# Altium footprint library SYNCBOX_V3I1.PcbLib: 251 footprints (part 1 of 16)
Each footprint in its own frame and in the unit in brackets; x right, y up, seen from the top. Pads: shape width x height; smd on the part's side, far side on the other; paste and mask are expansions set on the pad; w line width, h text height; cw(c..) or ccw(c..) is an arc to the next point about the centre after c.
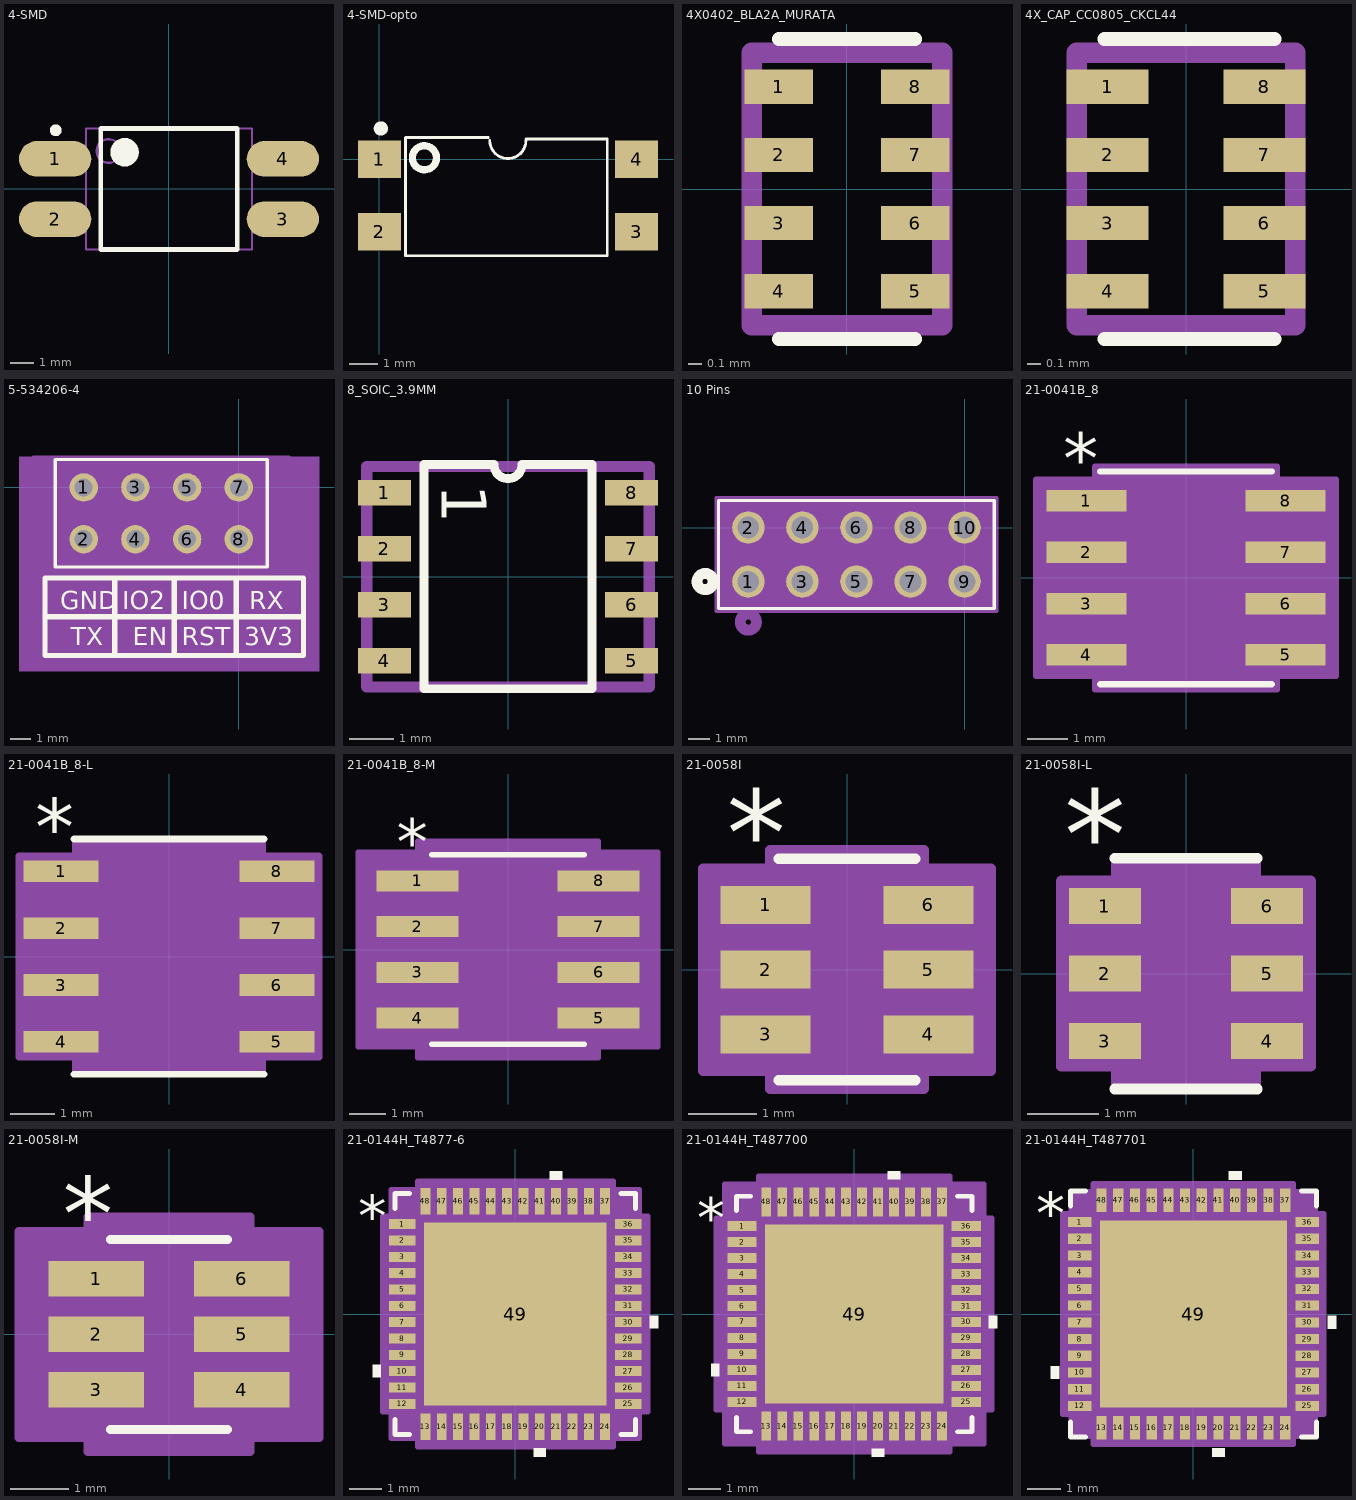
[diagram p0: the footprints below, top view; thin cyan lines are the x and y axes]

## 4-SMD [mm]
height 4.6
pads (4):
  oval 3.05x1.5 smd: 1(-4.8,1.27) 2(-4.8,-1.27) 3(4.8,-1.27) 4(4.8,1.27)
Top Overlay:
  circle w0.6: c-1.875,1.55 r0.3
  lines w0.2: -2.875,-2.55 -2.875,2.55 2.875,2.55 2.875,-2.55 -2.875,-2.55
  lines w0.25: -4.651,2.487 ccw(c-4.775,2.475) -4.65,2.475
Mechanical 13:
  circle w0.1: c-2.55,1.6 r0.5
  lines w0.1: -3.5,-2.55 -3.5,2.55 3.5,2.55 3.5,-2.55 -3.5,-2.55
3D body "LSOP-4.STEP": height 2.07, standoff -0.07, extent -4.947,-1.898 5.253,2.202

## 4-SMD-opto [mm]
pads (4):
  rect 1.5x1.3 smd: 1(0,0) 2(0,-2.54) 3(9,-2.54) 4(9,0)
Top Overlay:
  circle w0.254: c1.575,0.051 r0.423
  lines w0.1: 3.81,0.762 0.914,0.762 0.914,-3.378 7.976,-3.378 7.976,0.711 5.135,0.711 ; 3.861,0.66 ccw(c4.496,0.66) 5.131,0.66
  lines w0.25: 0.175,1.09 ccw(c0.051,1.078) 0.176,1.078
3D body "LSOP-4.STEP": height 2.09, standoff -0.05, extent -0.629,-3.345 9.571,0.755

## 4X0402_BLA2A_MURATA [mm]
pads (8):
  rect 0.5x0.25 smd mask+0.025: 1(-0.5,0.75) 2(-0.5,0.25) 3(-0.5,-0.25) 4(-0.5,-0.75) 5(0.5,-0.75) 6(0.5,-0.25) 7(0.5,0.25) 8(0.5,0.75)
Top Overlay:
  lines w0.1: -0.5,-1.1 0.5,-1.1 ; -0.5,1.1 0.5,1.1
Mechanical 16:
  lines w0.15: -0.7,-1 -0.7,1 0.7,1 0.7,-1 -0.7,-1
Mechanical 29:
  text ".Designator" at 0.2,-0.7 h0.4
3D body: height 0.5, standoff 0, extent -0.5,-1 0.5,1

## 4X_CAP_CC0805_CKCL44 [mm]
pads (8):
  rect 0.6x0.25 smd mask+0.025: 1(-0.575,0.75) 2(-0.575,0.25) 3(-0.575,-0.25) 4(-0.575,-0.75) 5(0.575,-0.75) 6(0.575,-0.25) 7(0.575,0.25) 8(0.575,0.75)
Top Overlay:
  lines w0.1: -0.6,-1.1 0.65,-1.1 ; -0.6,1.1 0.65,1.1
Mechanical 16:
  lines w0.15: -0.8,-1 -0.8,1 0.8,1 0.8,-1 -0.8,-1
Mechanical 29:
  text ".Designator" at -0.2,0.7 h0.4
3D body: height 1, standoff 0, extent -0.7,-1 0.7,1

## 5-534206-4 [mil]
pads (8):
  round 55 / inner round 60 / far side round 55 hole 35 paste+0 mask+0: 1(-300,0) 2(-300,-100) 3(-200,0) 4(-200,-100) 5(-100,0) 6(-100,-100) 7(0,0) 8(0,-100)
Top Overlay:
  lines w6: -355,-154 55,-154 55,54 -355,54 -355,-154
  lines w10: -375,-250 125,-250 ; -240,-325 -240,-175 ; -125,-325 -125,-175 ; -10,-175 -5,-175 -5,-325 ; -375,-325 -375,-175 125,-175 125,-325 -375,-325
  text "GND" at -345,-235 h35
  text "IO2" at -225,-235 h35
  text "IO0" at -110,-235 h35
  text "RX" at 20,-235 h35
  text "TX" at -325,-305 h35
  text "EN" at -205,-305 h35
  text "RST" at -110,-305 h35
  text "3V3" at 10,-305 h35
Mechanical 13:
  lines w1: -350,-149 50,-149 50,49 -350,49 -350,-149
Mechanical 15:
  region: 155,59 -425,59 -425,-355 155,-355
  region: 50,49 -350,49 -350,-149 50,-149
  lines w6: -398,-159 -398,59 98,59 98,-159 -398,-159
3D body: height 10, standoff 0, extent 0,0 10,10
3D body "5-534206-4.stp": height 340, standoff -170, extent -350,-150 50,50

## 8_SOIC_3.9MM [mm]
pads (8):
  rect 1.2x0.58 smd: 1(-2.8,1.905) 2(-2.8,0.635) 3(-2.8,-0.635) 4(-2.8,-1.905) 5(2.8,-1.905) 6(2.8,-0.635) 7(2.8,0.635) 8(2.8,1.905)
Top Overlay:
  lines w0.2: -1.905,-2.54 1.905,-2.54 1.905,2.54 0.318,2.54 cw(c0,2.54) -0.318,2.54 -1.905,2.54 -1.905,-2.54
  text "1" at -1.5,2.1 h1.02
Mechanical 16:
  circle w0.254: c-2.7,1.9 r0.1
  lines w0.254: -3.2,-2.5 -3.2,2.5 3.2,2.5 3.2,-2.5 -3.2,-2.5
Mechanical 29:
  text ".Designator" at 1.1,0.6 h1.52
3D body "SOIC-8-1.step": height 1.75, standoff 0, extent -3,-2.45 3,2.45

## 10 Pins [mil]
pads (10):
  round 60 hole 40 paste+0 mask+0: 1(-400,-100) 2(-400,0) 3(-300,-100) 4(-300,0) 5(-200,-100) 6(-200,0) 7(-100,-100) 8(-100,0) 9(0,-100) 10(0,0)
Top Overlay:
  circle w20: c-480,-100 r15
  lines w6: -455,-150 -455,50 55,50 55,-150 -455,-150
Bottom Overlay:
  circle w20: c-480,-100 r15
Mechanical 13:
  circle w20: c-400,-175 r15
  lines w1: -450,-145 -450,45 50,45 50,-145 -450,-145
Mechanical 15:
  region: 50,45 -450,45 -450,-145 50,-145
  region: 60,55 -460,55 -460,-155 60,-155
  lines w6: -460,-155 60,-155 60,55 -460,55 -460,-155
3D body: height 10, standoff 0, extent 0,0 10,10
3D body "PR20205VBDN.STEP": height 329.79, standoff -100.11, extent -450,-150 50,50

## 21-0041B_8 [mil]
pads (8):
  rect 78x21 smd paste+0 mask+0: 1(-97,75) 2(-97,25) 3(-97,-25) 4(-97,-75) 5(97,-75) 6(97,-25) 7(97,25) 8(97,75)
Top Overlay:
  lines w6: -83.5,-103.5 83.5,-103.5 ; -83.5,103.5 83.5,103.5
  text "*" at -119.5,91 h50
Mechanical 13:
  lines w0: -12,98.5 ccw(c0,98.5) 12,98.5
  lines w1: -122,-84.5 -122,-65.5 -78.5,-65.5 -78.5,-84.5 -122,-84.5 ; -122,-34.5 -122,-15.5 -78.5,-15.5 -78.5,-34.5 -122,-34.5 ; -122,15.5 -122,34.5 -78.5,34.5 -78.5,15.5 -122,15.5 ; -122,65.5 -122,84.5 -78.5,84.5 -78.5,65.5 -122,65.5 ; -78.5,-98.5 78.5,-98.5 78.5,98.5 -78.5,98.5 -78.5,-98.5 ; 78.5,-84.5 78.5,-65.5 122,-65.5 122,-84.5 78.5,-84.5 ; 78.5,-34.5 78.5,-15.5 122,-15.5 122,-34.5 78.5,-34.5 ; 78.5,15.5 78.5,34.5 122,34.5 122,15.5 78.5,15.5 ; 78.5,65.5 78.5,84.5 122,84.5 122,65.5 78.5,65.5
  text "*" at -76,45.5 h50
Mechanical 15:
  region: -88.5,-95.5 -146,-95.5 -146,95.5 -88.5,95.5 -88.5,108.5 88.5,108.5 88.5,95.5 146,95.5 146,-95.5 88.5,-95.5 88.5,-108.5 -88.5,-108.5
  lines w6: -146,-95.5 -146,95.5 -88.5,95.5 -88.5,108.5 88.5,108.5 88.5,95.5 146,95.5 146,-95.5 88.5,-95.5 88.5,-108.5 -88.5,-108.5 -88.5,-95.5 -146,-95.5
3D body "21-0041B_8.stp": height 69.09, standoff 0, extent -122.01,-98.5 122.01,98.5
3D body: height 10, standoff 0, extent 0,0 10,10

## 21-0041B_8-L [mil]
pads (8):
  rect 66x19 smd paste+0 mask+0: 1(-95,75) 2(-95,25) 3(-95,-25) 4(-95,-75) 5(95,-75) 6(95,-25) 7(95,25) 8(95,75)
Top Overlay:
  lines w6: -83.5,-103.5 83.5,-103.5 ; -83.5,103.5 83.5,103.5
  text "*" at -117.5,89 h50
Mechanical 13:
  lines w0: -12,98.5 ccw(c0,98.5) 12,98.5
  lines w1: -122,-84.5 -78.5,-84.5 -78.5,-65.5 -122,-65.5 -122,-84.5 ; -122,-34.5 -78.5,-34.5 -78.5,-15.5 -122,-15.5 -122,-34.5 ; -122,15.5 -78.5,15.5 -78.5,34.5 -122,34.5 -122,15.5 ; -122,65.5 -78.5,65.5 -78.5,84.5 -122,84.5 -122,65.5 ; -78.5,-98.5 -78.5,98.5 78.5,98.5 78.5,-98.5 -78.5,-98.5 ; 78.5,-84.5 122,-84.5 122,-65.5 78.5,-65.5 78.5,-84.5 ; 78.5,-34.5 122,-34.5 122,-15.5 78.5,-15.5 78.5,-34.5 ; 78.5,15.5 122,15.5 122,34.5 78.5,34.5 78.5,15.5 ; 78.5,65.5 122,65.5 122,84.5 78.5,84.5 78.5,65.5
  text "*" at -76,45.5 h50
Mechanical 15:
  region: -82.5,-88.5 -132,-88.5 -132,88.5 -82.5,88.5 -82.5,102.5 82.5,102.5 82.5,88.5 132,88.5 132,-88.5 82.5,-88.5 82.5,-102.5 -82.5,-102.5
  lines w6: -132,-88.5 -82.5,-88.5 -82.5,-102.5 82.5,-102.5 82.5,-88.5 132,-88.5 132,88.5 82.5,88.5 82.5,102.5 -82.5,102.5 -82.5,88.5 -132,88.5 -132,-88.5
3D body "21-0041B_8-L.stp": height 69.09, standoff 0, extent -122,-98.5 122.01,98.51
3D body: height 10, standoff 0, extent 0,0 10,10

## 21-0041B_8-M [mil]
pads (8):
  rect 90x23 smd paste+0 mask+0: 1(-99,75) 2(-99,25) 3(-99,-25) 4(-99,-75) 5(99,-75) 6(99,-25) 7(99,25) 8(99,75)
Top Overlay:
  lines w6: -83.5,-103.5 83.5,-103.5 ; -83.5,103.5 83.5,103.5
  text "*" at -121.5,93 h50
Mechanical 13:
  lines w0: -12,98.5 ccw(c0,98.5) 12,98.5
  lines w1: -122,-84.5 -122,-65.5 -78.5,-65.5 -78.5,-84.5 -122,-84.5 ; -122,-34.5 -122,-15.5 -78.5,-15.5 -78.5,-34.5 -122,-34.5 ; -122,15.5 -122,34.5 -78.5,34.5 -78.5,15.5 -122,15.5 ; -122,65.5 -122,84.5 -78.5,84.5 -78.5,65.5 -122,65.5 ; -78.5,-98.5 78.5,-98.5 78.5,98.5 -78.5,98.5 -78.5,-98.5 ; 78.5,-84.5 78.5,-65.5 122,-65.5 122,-84.5 78.5,-84.5 ; 78.5,-34.5 78.5,-15.5 122,-15.5 122,-34.5 78.5,-34.5 ; 78.5,15.5 78.5,34.5 122,34.5 122,15.5 78.5,15.5 ; 78.5,65.5 78.5,84.5 122,84.5 122,65.5 78.5,65.5
  text "*" at -76,45.5 h50
Mechanical 15:
  region: -98.5,-106.5 -164,-106.5 -164,106.5 -98.5,106.5 -98.5,118.5 98.5,118.5 98.5,106.5 164,106.5 164,-106.5 98.5,-106.5 98.5,-118.5 -98.5,-118.5
  lines w6: -164,-106.5 -164,106.5 -98.5,106.5 -98.5,118.5 98.5,118.5 98.5,106.5 164,106.5 164,-106.5 98.5,-106.5 98.5,-118.5 -98.5,-118.5 -98.5,-106.5 -164,-106.5
3D body "21-0041B_8-M.stp": height 69.09, standoff 0, extent -122,-98.5 122.01,98.51
3D body: height 10, standoff 0, extent 0,0 10,10

## 21-0058I [mil]
pads (6):
  rect 52x22 smd paste+0 mask+0: 1(-47,37.4) 2(-47,0) 3(-47,-37.4) 4(47,-37.4) 5(47,0) 6(47,37.4)
Top Overlay:
  lines w6: -39.5,-64 39.5,-64 ; -39.5,64 39.5,64
  text "*" at -69.5,54.4 h50
Mechanical 13:
  lines w0: -12,59 ccw(c0,59) 12,59
  lines w1: -59,-47.4 -59,-27.4 -34.5,-27.4 -34.5,-47.4 -59,-47.4 ; -59,-10 -59,10 -34.5,10 -34.5,-10 -59,-10 ; -59,27.4 -59,47.4 -34.5,47.4 -34.5,27.4 -59,27.4 ; -34.5,-59 34.5,-59 34.5,59 -34.5,59 -34.5,-59 ; 34.5,-47.4 34.5,-27.4 59,-27.4 59,-47.4 34.5,-47.4 ; 34.5,-10 34.5,10 59,10 59,-10 34.5,-10 ; 34.5,27.4 34.5,47.4 59,47.4 59,27.4 34.5,27.4
  text "*" at -32,6 h50
Mechanical 15:
  region: -44.5,-58.4 -83,-58.4 -83,58.4 -44.5,58.4 -44.5,69 44.5,69 44.5,58.4 83,58.4 83,-58.4 44.5,-58.4 44.5,-69 -44.5,-69
  lines w6: -83,-58.4 -83,58.4 -44.5,58.4 -44.5,69 44.5,69 44.5,58.4 83,58.4 83,-58.4 44.5,-58.4 44.5,-69 -44.5,-69 -44.5,-58.4 -83,-58.4
3D body: height 10, standoff 0, extent 0,0 10,10
3D body "21-0058I.stp": height 57.09, standoff 0, extent -59.02,-59.02 59.02,59.02

## 21-0058I-L [mil]
pads (6):
  rect 40x20 smd paste+0 mask+0: 1(-45,37.4) 2(-45,0) 3(-45,-37.4) 4(45,-37.4) 5(45,0) 6(45,37.4)
Top Overlay:
  lines w6: -39.5,-64 39.5,-64 ; -39.5,64 39.5,64
  text "*" at -67.5,52.4 h50
Mechanical 13:
  lines w0: -12,59 ccw(c0,59) 12,59
  lines w1: -59,-47.4 -59,-27.4 -34.5,-27.4 -34.5,-47.4 -59,-47.4 ; -59,-10 -59,10 -34.5,10 -34.5,-10 -59,-10 ; -59,27.4 -59,47.4 -34.5,47.4 -34.5,27.4 -59,27.4 ; -34.5,-59 34.5,-59 34.5,59 -34.5,59 -34.5,-59 ; 34.5,-47.4 34.5,-27.4 59,-27.4 59,-47.4 34.5,-47.4 ; 34.5,-10 34.5,10 59,10 59,-10 34.5,-10 ; 34.5,27.4 34.5,47.4 59,47.4 59,27.4 34.5,27.4
  text "*" at -32,6 h50
Mechanical 15:
  region: -38.5,-51.4 -69,-51.4 -69,51.4 -38.5,51.4 -38.5,63 38.5,63 38.5,51.4 69,51.4 69,-51.4 38.5,-51.4 38.5,-63 -38.5,-63
  lines w6: -69,-51.4 -69,51.4 -38.5,51.4 -38.5,63 38.5,63 38.5,51.4 69,51.4 69,-51.4 38.5,-51.4 38.5,-63 -38.5,-63 -38.5,-51.4 -69,-51.4
3D body: height 10, standoff 0, extent 0,0 10,10
3D body "21-0058I-L.stp": height 57.09, standoff 0, extent -59.01,-59.01 59.02,59.02

## 21-0058I-M [mil]
pads (6):
  rect 64x24 smd paste+0 mask+0: 1(-49,37.4) 2(-49,0) 3(-49,-37.4) 4(49,-37.4) 5(49,0) 6(49,37.4)
Top Overlay:
  lines w6: -39.5,-64 39.5,-64 ; -39.5,64 39.5,64
  text "*" at -71.5,56.4 h50
Mechanical 13:
  lines w0: -12,59 ccw(c0,59) 12,59
  lines w1: -59,-47.4 -34.5,-47.4 -34.5,-27.4 -59,-27.4 -59,-47.4 ; -59,-10 -34.5,-10 -34.5,10 -59,10 -59,-10 ; -59,27.4 -34.5,27.4 -34.5,47.4 -59,47.4 -59,27.4 ; -34.5,-59 -34.5,59 34.5,59 34.5,-59 -34.5,-59 ; 34.5,-47.4 59,-47.4 59,-27.4 34.5,-27.4 34.5,-47.4 ; 34.5,-10 59,-10 59,10 34.5,10 34.5,-10 ; 34.5,27.4 59,27.4 59,47.4 34.5,47.4 34.5,27.4
  text "*" at -32,6 h50
Mechanical 15:
  region: -54.5,-69.4 -101,-69.4 -101,69.4 -54.5,69.4 -54.5,79 54.5,79 54.5,69.4 101,69.4 101,-69.4 54.5,-69.4 54.5,-79 -54.5,-79
  lines w6: -101,-69.4 -54.5,-69.4 -54.5,-79 54.5,-79 54.5,-69.4 101,-69.4 101,69.4 54.5,69.4 54.5,79 -54.5,79 -54.5,69.4 -101,69.4 -101,-69.4
3D body "21-0058I-M.stp": height 57.09, standoff 0, extent -59.01,-59.01 59.02,59.02
3D body: height 10, standoff 0, extent 0,0 10,10

## 21-0144H_T4877-6 [mil]
pads (49):
  rect 32x12 smd paste+0 mask+0: 1(-136,108.27) 2(-136,88.58) 3(-136,68.9) 4(-136,49.21) 5(-136,29.53) 6(-136,9.84) 7(-136,-9.84) 8(-136,-29.53) 9(-136,-49.21) 10(-136,-68.9) 11(-136,-88.58) 12(-136,-108.27) 25(136,-108.27) 26(136,-88.58) 27(136,-68.9) 28(136,-49.21) 29(136,-29.53) 30(136,-9.84) 31(136,9.84) 32(136,29.53) 33(136,49.21) 34(136,68.9) 35(136,88.58) 36(136,108.27)
  rect 12x32 smd paste+0 mask+0: 13(-108.27,-136) 14(-88.58,-136) 15(-68.9,-136) 16(-49.21,-136) 17(-29.53,-136) 18(-9.84,-136) 19(9.84,-136) 20(29.53,-136) 21(49.21,-136) 22(68.9,-136) 23(88.58,-136) 24(108.27,-136) 37(108.27,136) 38(88.58,136) 39(68.9,136) 40(49.21,136) 41(29.53,136) 42(9.84,136) 43(-9.84,136) 44(-29.53,136) 45(-49.21,136) 46(-68.9,136) 47(-88.58,136) 48(-108.27,136)
  rect 220x220 smd paste-109.5 mask+0: 49(0,0)
Top Overlay:
  region: -162,-61.4 -172,-61.4 -172,-76.4 -162,-76.4
  region: 37.03,-162 22.03,-162 22.03,-172 37.03,-172
  region: 162,-2.34 172,-2.34 172,-17.34 162,-17.34
  region: 56.71,162 41.71,162 41.71,172 56.71,172
  lines w6: -145,-127.37 -145,-145 -127.37,-145 ; -145,127.37 -145,145 -127.37,145 ; 127.37,-145 145,-145 145,-127.37 ; 127.37,145 145,145 145,127.37
  text "*" at -189.5,93.11 h50
Top Paste:
  region: -58.94,106.06 -106.06,106.06 -106.06,58.94 -58.94,58.94
  region: -58.94,51.06 -106.06,51.06 -106.06,3.94 -58.94,3.94
  region: -58.94,-3.94 -106.06,-3.94 -106.06,-51.06 -58.94,-51.06
  region: -58.94,-58.94 -106.06,-58.94 -106.06,-106.06 -58.94,-106.06
  region: -3.94,106.06 -51.06,106.06 -51.06,58.94 -3.94,58.94
  region: -3.94,51.06 -51.06,51.06 -51.06,3.94 -3.94,3.94
  region: -3.94,-3.94 -51.06,-3.94 -51.06,-51.06 -3.94,-51.06
  region: -3.94,-58.94 -51.06,-58.94 -51.06,-106.06 -3.94,-106.06
  region: 51.06,106.06 3.94,106.06 3.94,58.94 51.06,58.94
  region: 51.06,51.06 3.94,51.06 3.94,3.94 51.06,3.94
  region: 51.06,-3.94 3.94,-3.94 3.94,-51.06 51.06,-51.06
  region: 51.06,-58.94 3.94,-58.94 3.94,-106.06 51.06,-106.06
  region: 106.06,106.06 58.94,106.06 58.94,58.94 106.06,58.94
  region: 106.06,51.06 58.94,51.06 58.94,3.94 106.06,3.94
  region: 106.06,-3.94 58.94,-3.94 58.94,-51.06 106.06,-51.06
  region: 106.06,-58.94 58.94,-58.94 58.94,-106.06 106.06,-106.06
Mechanical 13:
  lines w1: -140,90 -90,140 ; -140,-140 140,-140 140,140 -140,140 -140,-140 ; -140,-114.27 -140,-102.27 -140,-114.27 ; -140,-94.58 -140,-82.58 -140,-94.58 ; -140,-74.9 -140,-62.9 -140,-74.9 ; -140,-55.21 -140,-43.21 -140,-55.21 ; -140,-35.53 -140,-23.53 -140,-35.53 ; -140,-15.84 -140,-3.84 -140,-15.84 ; -140,3.84 -140,15.84 -140,3.84 ; -140,23.53 -140,35.53 -140,23.53 ; -140,43.21 -140,55.21 -140,43.21 ; -140,62.9 -140,74.9 -140,62.9 ; -140,82.58 -140,94.58 -140,82.58 ; -140,102.27 -140,114.27 -140,102.27 ; -114.27,-140 -102.27,-140 -114.27,-140 ; -114.27,140 -102.27,140 -114.27,140 ; -94.58,-140 -82.58,-140 -94.58,-140 ; -94.58,140 -82.58,140 -94.58,140 ; -74.9,-140 -62.9,-140 -74.9,-140 ; -74.9,140 -62.9,140 -74.9,140 ; -55.21,-140 -43.21,-140 -55.21,-140 ; -55.21,140 -43.21,140 -55.21,140 ; -35.53,-140 -23.53,-140 -35.53,-140 ; -35.53,140 -23.53,140 -35.53,140 ; -15.84,-140 -3.84,-140 -15.84,-140 ; -15.84,140 -3.84,140 -15.84,140 ; 3.84,-140 15.84,-140 3.84,-140 ; 3.84,140 15.84,140 3.84,140 ; 23.53,-140 35.53,-140 23.53,-140 ; 23.53,140 35.53,140 23.53,140 ; 43.21,-140 55.21,-140 43.21,-140 ; 43.21,140 55.21,140 43.21,140 ; 62.9,-140 74.9,-140 62.9,-140 ; 62.9,140 74.9,140 62.9,140 ; 82.58,-140 94.58,-140 82.58,-140 ; 82.58,140 94.58,140 82.58,140 ; 102.27,-140 114.27,-140 102.27,-140 ; 102.27,140 114.27,140 102.27,140 ; 140,-114.27 140,-102.27 140,-114.27 ; 140,-94.58 140,-82.58 140,-94.58 ; 140,-74.9 140,-62.9 140,-74.9 ; 140,-55.21 140,-43.21 140,-55.21 ; 140,-35.53 140,-23.53 140,-35.53 ; 140,-15.84 140,-3.84 140,-15.84 ; 140,3.84 140,15.84 140,3.84 ; 140,23.53 140,35.53 140,23.53 ; 140,43.21 140,55.21 140,43.21 ; 140,62.9 140,74.9 140,62.9 ; 140,82.58 140,94.58 140,82.58 ; 140,102.27 140,114.27 140,102.27
  text "*" at -132.5,93.11 h50
Mechanical 15:
  region: -118.11,-150 -150,-150 -150,-118.11 -160,-118.11 -160,118.11 -150,118.11 -150,150 -118.11,150 -118.11,160 118.11,160 118.11,150 150,150 150,118.11 160,118.11 160,-118.11 150,-118.11 150,-150 118.11,-150 118.11,-160 -118.11,-160
  lines w6: -160,-118.11 -150,-118.11 -150,-150 -118.11,-150 -118.11,-160 118.11,-160 118.11,-150 150,-150 150,-118.11 160,-118.11 160,118.11 150,118.11 150,150 118.11,150 118.11,160 -118.11,160 -118.11,150 -150,150 -150,118.11 -160,118.11 -160,-118.11
3D body "21-0144H_T4877-6.stp": height 32.09, standoff 0, extent -140,-140 140,140
3D body: height 10, standoff 0, extent 0,0 10,10

## 21-0144H_T487700 [mil]
pads (49):
  rect 36x12 smd paste+0 mask+0: 1(-138,108.27) 2(-138,88.58) 3(-138,68.9) 4(-138,49.21) 5(-138,29.53) 6(-138,9.84) 7(-138,-9.84) 8(-138,-29.53) 9(-138,-49.21) 10(-138,-68.9) 11(-138,-88.58) 12(-138,-108.27) 25(138,-108.27) 26(138,-88.58) 27(138,-68.9) 28(138,-49.21) 29(138,-29.53) 30(138,-9.84) 31(138,9.84) 32(138,29.53) 33(138,49.21) 34(138,68.9) 35(138,88.58) 36(138,108.27)
  rect 12x36 smd paste+0 mask+0: 13(-108.27,-138) 14(-88.58,-138) 15(-68.9,-138) 16(-49.21,-138) 17(-29.53,-138) 18(-9.84,-138) 19(9.84,-138) 20(29.53,-138) 21(49.21,-138) 22(68.9,-138) 23(88.58,-138) 24(108.27,-138) 37(108.27,138) 38(88.58,138) 39(68.9,138) 40(49.21,138) 41(29.53,138) 42(9.84,138) 43(-9.84,138) 44(-29.53,138) 45(-49.21,138) 46(-68.9,138) 47(-88.58,138) 48(-108.27,138)
  rect 220x220 smd paste-109.5 mask+0: 49(0,0)
Top Overlay:
  region: -166,-61.4 -176,-61.4 -176,-76.4 -166,-76.4
  region: 37.03,-166 22.03,-166 22.03,-176 37.03,-176
  region: 166,-2.34 176,-2.34 176,-17.34 166,-17.34
  region: 56.71,166 41.71,166 41.71,176 56.71,176
  lines w6: -145,-127.37 -145,-145 -127.37,-145 ; -145,127.37 -145,145 -127.37,145 ; 127.37,-145 145,-145 145,-127.37 ; 127.37,145 145,145 145,127.37
  text "*" at -193.5,93.11 h50
Top Paste:
  region: -58.94,106.06 -106.06,106.06 -106.06,58.94 -58.94,58.94
  region: -58.94,51.06 -106.06,51.06 -106.06,3.94 -58.94,3.94
  region: -58.94,-3.94 -106.06,-3.94 -106.06,-51.06 -58.94,-51.06
  region: -58.94,-58.94 -106.06,-58.94 -106.06,-106.06 -58.94,-106.06
  region: -3.94,106.06 -51.06,106.06 -51.06,58.94 -3.94,58.94
  region: -3.94,51.06 -51.06,51.06 -51.06,3.94 -3.94,3.94
  region: -3.94,-3.94 -51.06,-3.94 -51.06,-51.06 -3.94,-51.06
  region: -3.94,-58.94 -51.06,-58.94 -51.06,-106.06 -3.94,-106.06
  region: 51.06,106.06 3.94,106.06 3.94,58.94 51.06,58.94
  region: 51.06,51.06 3.94,51.06 3.94,3.94 51.06,3.94
  region: 51.06,-3.94 3.94,-3.94 3.94,-51.06 51.06,-51.06
  region: 51.06,-58.94 3.94,-58.94 3.94,-106.06 51.06,-106.06
  region: 106.06,106.06 58.94,106.06 58.94,58.94 106.06,58.94
  region: 106.06,51.06 58.94,51.06 58.94,3.94 106.06,3.94
  region: 106.06,-3.94 58.94,-3.94 58.94,-51.06 106.06,-51.06
  region: 106.06,-58.94 58.94,-58.94 58.94,-106.06 106.06,-106.06
Mechanical 13:
  lines w1: -140,90 -90,140 ; -140,-140 140,-140 140,140 -140,140 -140,-140 ; -140,-114.27 -140,-102.27 -140,-114.27 ; -140,-94.58 -140,-82.58 -140,-94.58 ; -140,-74.9 -140,-62.9 -140,-74.9 ; -140,-55.21 -140,-43.21 -140,-55.21 ; -140,-35.53 -140,-23.53 -140,-35.53 ; -140,-15.84 -140,-3.84 -140,-15.84 ; -140,3.84 -140,15.84 -140,3.84 ; -140,23.53 -140,35.53 -140,23.53 ; -140,43.21 -140,55.21 -140,43.21 ; -140,62.9 -140,74.9 -140,62.9 ; -140,82.58 -140,94.58 -140,82.58 ; -140,102.27 -140,114.27 -140,102.27 ; -114.27,-140 -102.27,-140 -114.27,-140 ; -114.27,140 -102.27,140 -114.27,140 ; -94.58,-140 -82.58,-140 -94.58,-140 ; -94.58,140 -82.58,140 -94.58,140 ; -74.9,-140 -62.9,-140 -74.9,-140 ; -74.9,140 -62.9,140 -74.9,140 ; -55.21,-140 -43.21,-140 -55.21,-140 ; -55.21,140 -43.21,140 -55.21,140 ; -35.53,-140 -23.53,-140 -35.53,-140 ; -35.53,140 -23.53,140 -35.53,140 ; -15.84,-140 -3.84,-140 -15.84,-140 ; -15.84,140 -3.84,140 -15.84,140 ; 3.84,-140 15.84,-140 3.84,-140 ; 3.84,140 15.84,140 3.84,140 ; 23.53,-140 35.53,-140 23.53,-140 ; 23.53,140 35.53,140 23.53,140 ; 43.21,-140 55.21,-140 43.21,-140 ; 43.21,140 55.21,140 43.21,140 ; 62.9,-140 74.9,-140 62.9,-140 ; 62.9,140 74.9,140 62.9,140 ; 82.58,-140 94.58,-140 82.58,-140 ; 82.58,140 94.58,140 82.58,140 ; 102.27,-140 114.27,-140 102.27,-140 ; 102.27,140 114.27,140 102.27,140 ; 140,-114.27 140,-102.27 140,-114.27 ; 140,-94.58 140,-82.58 140,-94.58 ; 140,-74.9 140,-62.9 140,-74.9 ; 140,-55.21 140,-43.21 140,-55.21 ; 140,-35.53 140,-23.53 140,-35.53 ; 140,-15.84 140,-3.84 140,-15.84 ; 140,3.84 140,15.84 140,3.84 ; 140,23.53 140,35.53 140,23.53 ; 140,43.21 140,55.21 140,43.21 ; 140,62.9 140,74.9 140,62.9 ; 140,82.58 140,94.58 140,82.58 ; 140,102.27 140,114.27 140,102.27
  text "*" at -132.5,93.11 h50
Mechanical 15:
  region: -118.11,-160 -160,-160 -160,-118.11 -170,-118.11 -170,118.11 -160,118.11 -160,160 -118.11,160 -118.11,170 118.11,170 118.11,160 160,160 160,118.11 170,118.11 170,-118.11 160,-118.11 160,-160 118.11,-160 118.11,-170 -118.11,-170
  lines w6: -170,-118.11 -160,-118.11 -160,-160 -118.11,-160 -118.11,-170 118.11,-170 118.11,-160 160,-160 160,-118.11 170,-118.11 170,118.11 160,118.11 160,160 118.11,160 118.11,170 -118.11,170 -118.11,160 -160,160 -160,118.11 -170,118.11 -170,-118.11
3D body: height 10, standoff 0, extent 0,0 10,10
3D body "21-0144H_T4877-6-M.stp": height 32.09, standoff 0, extent -140,-140 140,140

## 21-0144H_T487701 [mil]
pads (49):
  rect 28x12 smd paste+0 mask+0: 1(-134,108.27) 2(-134,88.58) 3(-134,68.9) 4(-134,49.21) 5(-134,29.53) 6(-134,9.84) 7(-134,-9.84) 8(-134,-29.53) 9(-134,-49.21) 10(-134,-68.9) 11(-134,-88.58) 12(-134,-108.27) 25(134,-108.27) 26(134,-88.58) 27(134,-68.9) 28(134,-49.21) 29(134,-29.53) 30(134,-9.84) 31(134,9.84) 32(134,29.53) 33(134,49.21) 34(134,68.9) 35(134,88.58) 36(134,108.27)
  rect 12x28 smd paste+0 mask+0: 13(-108.27,-134) 14(-88.58,-134) 15(-68.9,-134) 16(-49.21,-134) 17(-29.53,-134) 18(-9.84,-134) 19(9.84,-134) 20(29.53,-134) 21(49.21,-134) 22(68.9,-134) 23(88.58,-134) 24(108.27,-134) 37(108.27,134) 38(88.58,134) 39(68.9,134) 40(49.21,134) 41(29.53,134) 42(9.84,134) 43(-9.84,134) 44(-29.53,134) 45(-49.21,134) 46(-68.9,134) 47(-88.58,134) 48(-108.27,134)
  rect 220x220 smd paste-109.5 mask+0: 49(0,0)
Top Overlay:
  region: -158,-61.4 -168,-61.4 -168,-76.4 -158,-76.4
  region: 37.03,-158 22.03,-158 22.03,-168 37.03,-168
  region: 158,-2.34 168,-2.34 168,-17.34 158,-17.34
  region: 56.71,158 41.71,158 41.71,168 56.71,168
  lines w6: -145,-127.37 -145,-145 -127.37,-145 ; -145,127.37 -145,145 -127.37,145 ; 127.37,-145 145,-145 145,-127.37 ; 127.37,145 145,145 145,127.37
  text "*" at -185.5,93.11 h50
Top Paste:
  region: -58.94,106.06 -106.06,106.06 -106.06,58.94 -58.94,58.94
  region: -58.94,51.06 -106.06,51.06 -106.06,3.94 -58.94,3.94
  region: -58.94,-3.94 -106.06,-3.94 -106.06,-51.06 -58.94,-51.06
  region: -58.94,-58.94 -106.06,-58.94 -106.06,-106.06 -58.94,-106.06
  region: -3.94,106.06 -51.06,106.06 -51.06,58.94 -3.94,58.94
  region: -3.94,51.06 -51.06,51.06 -51.06,3.94 -3.94,3.94
  region: -3.94,-3.94 -51.06,-3.94 -51.06,-51.06 -3.94,-51.06
  region: -3.94,-58.94 -51.06,-58.94 -51.06,-106.06 -3.94,-106.06
  region: 51.06,106.06 3.94,106.06 3.94,58.94 51.06,58.94
  region: 51.06,51.06 3.94,51.06 3.94,3.94 51.06,3.94
  region: 51.06,-3.94 3.94,-3.94 3.94,-51.06 51.06,-51.06
  region: 51.06,-58.94 3.94,-58.94 3.94,-106.06 51.06,-106.06
  region: 106.06,106.06 58.94,106.06 58.94,58.94 106.06,58.94
  region: 106.06,51.06 58.94,51.06 58.94,3.94 106.06,3.94
  region: 106.06,-3.94 58.94,-3.94 58.94,-51.06 106.06,-51.06
  region: 106.06,-58.94 58.94,-58.94 58.94,-106.06 106.06,-106.06
Mechanical 13:
  lines w1: -140,90 -90,140 ; -140,-140 140,-140 140,140 -140,140 -140,-140 ; -140,-114.27 -140,-102.27 -140,-114.27 ; -140,-94.58 -140,-82.58 -140,-94.58 ; -140,-74.9 -140,-62.9 -140,-74.9 ; -140,-55.21 -140,-43.21 -140,-55.21 ; -140,-35.53 -140,-23.53 -140,-35.53 ; -140,-15.84 -140,-3.84 -140,-15.84 ; -140,3.84 -140,15.84 -140,3.84 ; -140,23.53 -140,35.53 -140,23.53 ; -140,43.21 -140,55.21 -140,43.21 ; -140,62.9 -140,74.9 -140,62.9 ; -140,82.58 -140,94.58 -140,82.58 ; -140,102.27 -140,114.27 -140,102.27 ; -114.27,-140 -102.27,-140 -114.27,-140 ; -114.27,140 -102.27,140 -114.27,140 ; -94.58,-140 -82.58,-140 -94.58,-140 ; -94.58,140 -82.58,140 -94.58,140 ; -74.9,-140 -62.9,-140 -74.9,-140 ; -74.9,140 -62.9,140 -74.9,140 ; -55.21,-140 -43.21,-140 -55.21,-140 ; -55.21,140 -43.21,140 -55.21,140 ; -35.53,-140 -23.53,-140 -35.53,-140 ; -35.53,140 -23.53,140 -35.53,140 ; -15.84,-140 -3.84,-140 -15.84,-140 ; -15.84,140 -3.84,140 -15.84,140 ; 3.84,-140 15.84,-140 3.84,-140 ; 3.84,140 15.84,140 3.84,140 ; 23.53,-140 35.53,-140 23.53,-140 ; 23.53,140 35.53,140 23.53,140 ; 43.21,-140 55.21,-140 43.21,-140 ; 43.21,140 55.21,140 43.21,140 ; 62.9,-140 74.9,-140 62.9,-140 ; 62.9,140 74.9,140 62.9,140 ; 82.58,-140 94.58,-140 82.58,-140 ; 82.58,140 94.58,140 82.58,140 ; 102.27,-140 114.27,-140 102.27,-140 ; 102.27,140 114.27,140 102.27,140 ; 140,-114.27 140,-102.27 140,-114.27 ; 140,-94.58 140,-82.58 140,-94.58 ; 140,-74.9 140,-62.9 140,-74.9 ; 140,-55.21 140,-43.21 140,-55.21 ; 140,-35.53 140,-23.53 140,-35.53 ; 140,-15.84 140,-3.84 140,-15.84 ; 140,3.84 140,15.84 140,3.84 ; 140,23.53 140,35.53 140,23.53 ; 140,43.21 140,55.21 140,43.21 ; 140,62.9 140,74.9 140,62.9 ; 140,82.58 140,94.58 140,82.58 ; 140,102.27 140,114.27 140,102.27
  text "*" at -132.5,93.11 h50
Mechanical 15:
  region: -118.11,-144 -144,-144 -144,-118.11 -154,-118.11 -154,118.11 -144,118.11 -144,144 -118.11,144 -118.11,154 118.11,154 118.11,144 144,144 144,118.11 154,118.11 154,-118.11 144,-118.11 144,-144 118.11,-144 118.11,-154 -118.11,-154
  lines w6: -154,-118.11 -144,-118.11 -144,-144 -118.11,-144 -118.11,-154 118.11,-154 118.11,-144 144,-144 144,-118.11 154,-118.11 154,118.11 144,118.11 144,144 118.11,144 118.11,154 -118.11,154 -118.11,144 -144,144 -144,118.11 -154,118.11 -154,-118.11
3D body: height 10, standoff 0, extent 0,0 10,10
3D body "21-0144H_T4877-6-L.stp": height 32.09, standoff 0, extent -140,-140 140,140